# Altium footprint library PcbLib1.PcbLib: 1 footprints
Each footprint in its own frame and in the unit in brackets; x right, y up, seen from the top. Pads: shape width x height; smd on the part's side, far side on the other; paste and mask are expansions set on the pad; w line width, h text height; cw(c..) or ccw(c..) is an arc to the next point about the centre after c.
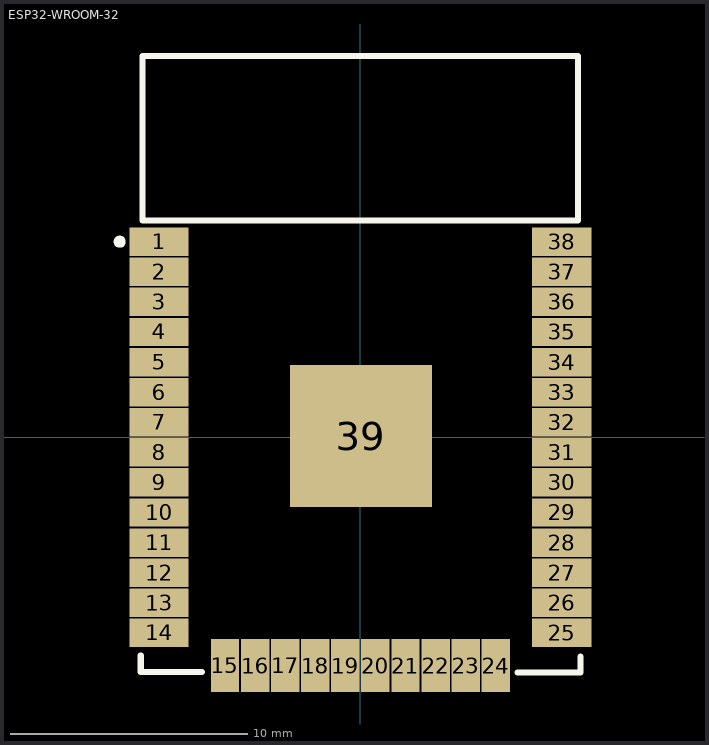
[diagram p0: the footprint, top view; thin cyan lines are the x and y axes]

## ESP32-WROOM-32 [mm]
pads (39):
  rect 2.5x1.2 smd: 1(-8.5,8.255) 2(-8.5,6.985) 3(-8.5,5.715) 4(-8.5,4.445) 5(-8.5,3.175) 6(-8.5,1.905) 7(-8.5,0.635) 8(-8.5,-0.635) 9(-8.5,-1.905) 10(-8.5,-3.175) 11(-8.5,-4.445) 12(-8.5,-5.715) 13(-8.5,-6.985) 14(-8.5,-8.255) 25(8.5,-8.255) 26(8.5,-6.985) 27(8.5,-5.715) 28(8.5,-4.445) 29(8.5,-3.175) 30(8.5,-1.905) 31(8.5,-0.635) 32(8.5,0.635) 33(8.5,1.905) 34(8.5,3.175) 35(8.5,4.445) 36(8.5,5.715) 37(8.5,6.985) 38(8.5,8.255)
  rect 1.2x2.25 smd: 15(-5.715,-9.636) 16(-4.445,-9.636) 17(-3.175,-9.636) 18(-1.905,-9.636) 19(-0.635,-9.636) 20(0.635,-9.636) 21(1.905,-9.636) 22(3.175,-9.636) 23(4.445,-9.636) 24(5.715,-9.636)
  rect 6x6 smd: 39(0.025,0.051)
Top Overlay:
  circle w0.254: c-10.16,8.255 r0.127
  lines w0.254: -9.271,-9.22 -9.271,-9.906 -6.68,-9.906 ; 6.629,-9.931 9.296,-9.931 9.296,-9.246 ; -9.195,9.144 9.195,9.144 9.195,16.104 -9.195,16.104 -9.195,9.144
3D body "User Library-esp-wroom-32.step": height 3, standoff -0.04, extent -9.035,-9.652 9.035,15.888
3D body: height 0.25, standoff 0, extent -10.414,-12.065 -10.414,-12.065